# Altium integrated library VLS3012HBX-2R2M-N.IntLib: 1 symbol
Pins are listed as number, name and electrical type; pins without a type are passive.

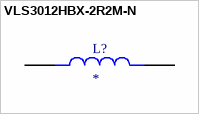
[diagram p0: symbol VLS3012HBX-2R2M-N]

## VLS3012HBX-2R2M-N
designator L?
INDUCTORS FOR POWER CIRCUITS, WO; MF: TDK Corporation; MP: VLS3012HBX-2R2M-N; Package: None; Purchase-URL: https://pricing.snapeda.com/search/part/VLS3012HBX-2R2M-N/?ref=eda; Value: *; Availability: In Stock; SnapEDA_Link: https://www.snapeda.com/parts/VLS3012HBX-2R2M-N/TDK/view-part/?ref=snap; Price: None; Check_prices: https://www.snapeda.com/parts/VLS3012HBX-2R2M-N/TDK/view-part/?ref=eda
footprint IND_VLS3012HBX-2R2M-N
pins: 1, 2